# Altium footprint library Package_DFN_QFN.PcbLib: 735 footprints (part 15 of 46)
Each footprint in its own frame and in the unit in brackets; x right, y up, seen from the top. Pads: shape width x height; smd on the part's side, far side on the other; paste and mask are expansions set on the pad; w line width, h text height; cw(c..) or ccw(c..) is an arc to the next point about the centre after c.
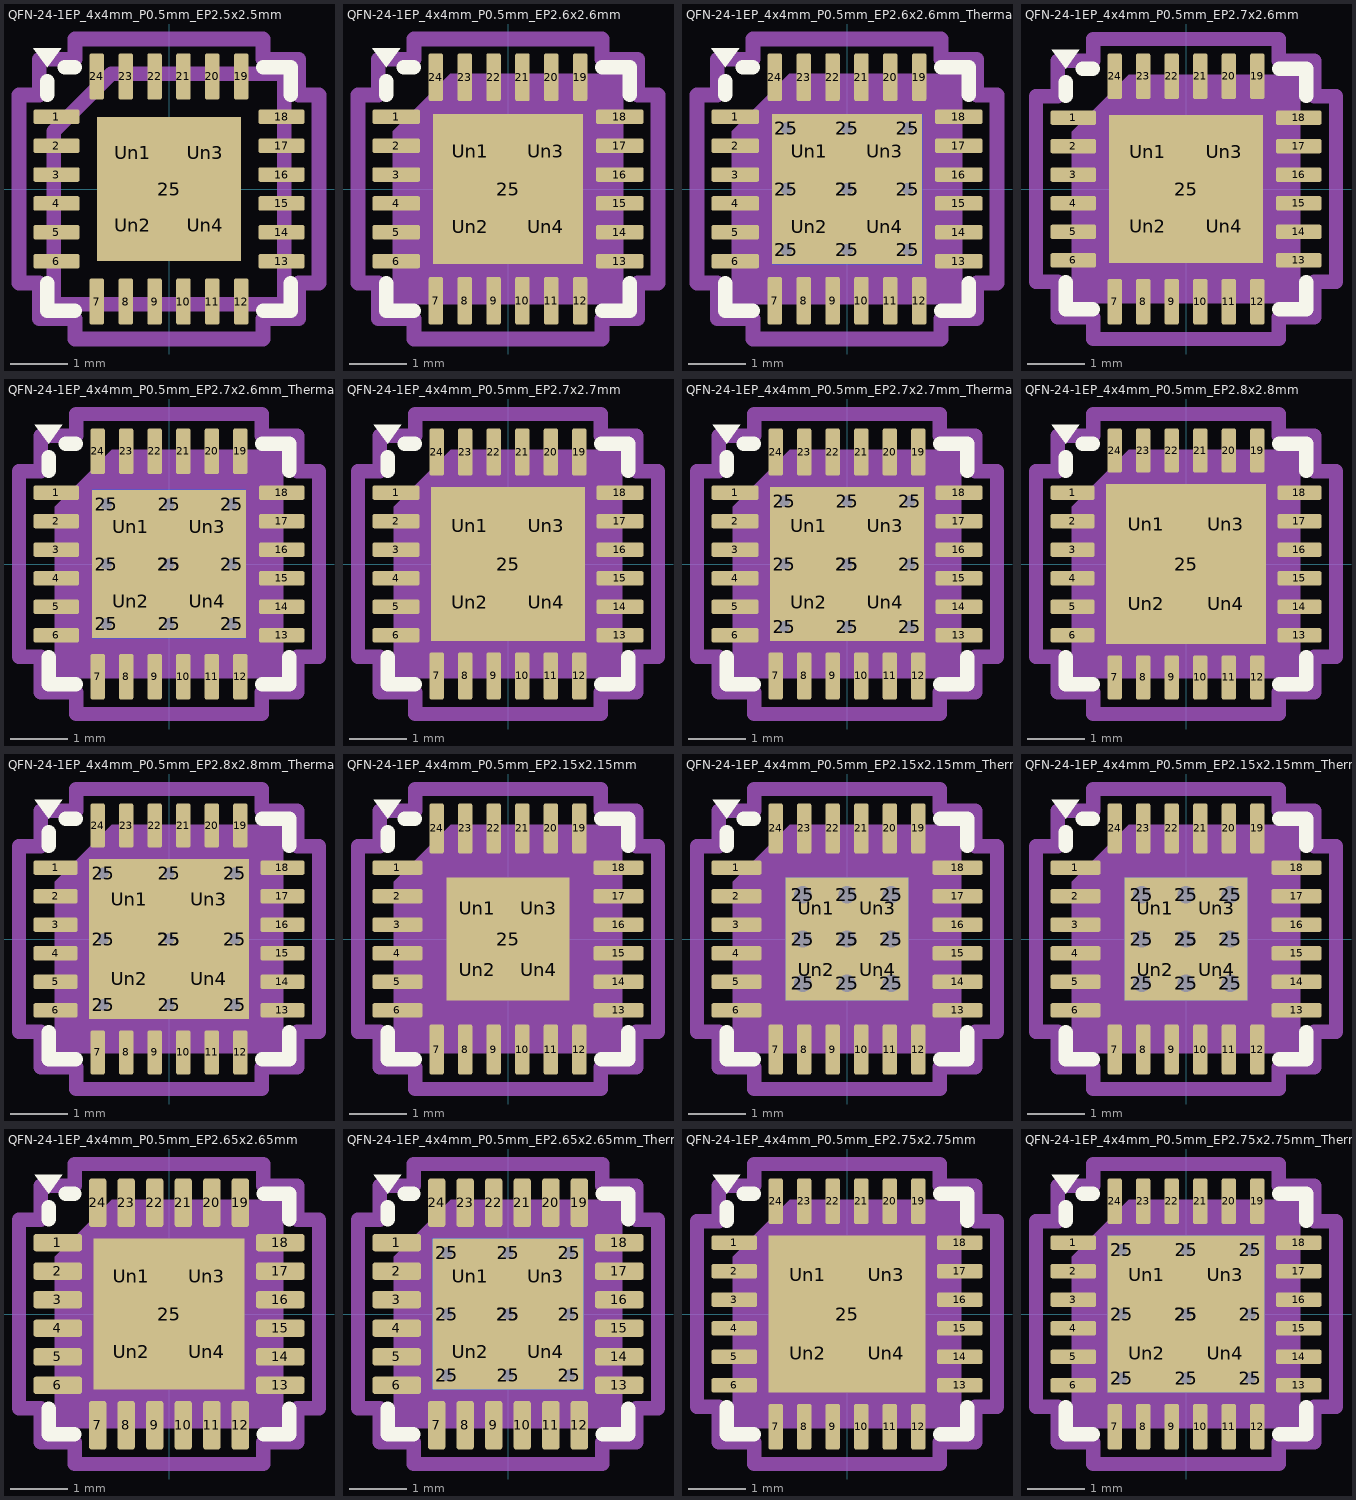
[diagram p14: the footprints below, top view; thin cyan lines are the x and y axes]

## QFN-24-1EP_4x4mm_P0.5mm_EP2.5x2.5mm [mm] "QFN-24-1EP_4x4mm_P0.5mm_EP2.5x2.5mm"
pads (29):
  rrect25% 0.8x0.25 smd: 1(-1.95,1.25) 2(-1.95,0.75) 3(-1.95,0.25) 4(-1.95,-0.25) 5(-1.95,-0.75) 6(-1.95,-1.25) 13(1.95,-1.25) 14(1.95,-0.75) 15(1.95,-0.25) 16(1.95,0.25) 17(1.95,0.75) 18(1.95,1.25)
  rrect25% 0.25x0.8 smd: 7(-1.25,-1.95) 8(-0.75,-1.95) 9(-0.25,-1.95) 10(0.25,-1.95) 11(0.75,-1.95) 12(1.25,-1.95) 19(1.25,1.95) 20(0.75,1.95) 21(0.25,1.95) 22(-0.25,1.95) 23(-0.75,1.95) 24(-1.25,1.95)
  rect 2.5x2.5 smd: 25(0,0)
  rrect25% 1.01x1.01 on Top Paste: Un1(-0.625,0.625) Un2(-0.625,-0.625) Un3(0.625,0.625) Un4(0.625,-0.625)
F.SilkS:
  region: -2.11,2.11 -2.35,2.44 -1.87,2.44
  lines w0.254: -2.11,-1.635 -2.11,-2.11 -1.635,-2.11 ; -2.11,1.635 -2.11,1.87 ; -1.81,2.11 -1.635,2.11 ; 1.635,-2.11 2.11,-2.11 2.11,-1.635 ; 1.635,2.11 2.11,2.11 2.11,1.635
Top Component Center:
  lines w0.127: -0.127,0 0.127,0 -0.127,0 ; 0,-0.127 0,0.127 0,-0.127
Top Assembly:
  lines w0.254: -2,-2 -2,1 -1,2 2,2 2,-2 -2,-2
Top Courtyard:
  lines w0.254: -2.6,-1.63 -2.6,1.63 -2.25,1.63 -2.25,2.25 -1.63,2.25 -1.63,2.6 1.63,2.6 1.63,2.25 2.25,2.25 2.25,1.63 2.6,1.63 2.6,-1.63 2.25,-1.63 2.25,-2.25 1.63,-2.25 1.63,-2.6 -1.63,-2.6 -1.63,-2.25 -2.25,-2.25 -2.25,-1.63 -2.6,-1.63
Top Designator:
  text ".Designator" at -3.43,-0.344 h1.52
3D body "QFN-24-1EP_4x4mm_P0.5mm_EP2.6x2.6mm.step": height 0.77, standoff 0, extent -2,-2 2,2

## QFN-24-1EP_4x4mm_P0.5mm_EP2.6x2.6mm [mm] "QFN-24-1EP_4x4mm_P0.5mm_EP2.6x2.6mm"
pads (29):
  rrect25% 0.825x0.25 smd: 1(-1.937,1.25) 2(-1.937,0.75) 3(-1.937,0.25) 4(-1.937,-0.25) 5(-1.937,-0.75) 6(-1.937,-1.25) 13(1.937,-1.25) 14(1.937,-0.75) 15(1.937,-0.25) 16(1.937,0.25) 17(1.937,0.75) 18(1.937,1.25)
  rrect25% 0.25x0.825 smd: 7(-1.25,-1.937) 8(-0.75,-1.937) 9(-0.25,-1.937) 10(0.25,-1.937) 11(0.75,-1.937) 12(1.25,-1.937) 19(1.25,1.937) 20(0.75,1.937) 21(0.25,1.937) 22(-0.25,1.937) 23(-0.75,1.937) 24(-1.25,1.937)
  rect 2.6x2.6 smd: 25(0,0)
  rrect24% 1.05x1.05 on Top Paste: Un1(-0.65,0.65) Un2(-0.65,-0.65) Un3(0.65,0.65) Un4(0.65,-0.65)
F.SilkS:
  region: -2.11,2.11 -2.35,2.44 -1.87,2.44
  lines w0.254: -2.11,-1.635 -2.11,-2.11 -1.635,-2.11 ; -2.11,1.635 -2.11,1.87 ; -1.81,2.11 -1.635,2.11 ; 1.635,-2.11 2.11,-2.11 2.11,-1.635 ; 1.635,2.11 2.11,2.11 2.11,1.635
Top Component Center:
  lines w0.127: -0.127,0 0.127,0 -0.127,0 ; 0,-0.127 0,0.127 0,-0.127
Top Assembly:
  region: 2,-2 -2,-2 -2,1 -1,2 2,2
Top Courtyard:
  lines w0.254: -2.6,-1.63 -2.6,1.63 -2.25,1.63 -2.25,2.25 -1.63,2.25 -1.63,2.6 1.63,2.6 1.63,2.25 2.25,2.25 2.25,1.63 2.6,1.63 2.6,-1.63 2.25,-1.63 2.25,-2.25 1.63,-2.25 1.63,-2.6 -1.63,-2.6 -1.63,-2.25 -2.25,-2.25 -2.25,-1.63 -2.6,-1.63
Top Designator:
  text ".Designator" at -3.43,-0.344 h1.52
3D body "QFN-24-1EP_4x4mm_P0.5mm_EP2.6x2.6mm.step": height 0.77, standoff 0, extent -2,-2 2,2

## QFN-24-1EP_4x4mm_P0.5mm_EP2.6x2.6mm_ThermalVias [mm] "QFN-24-1EP_4x4mm_P0.5mm_EP2.6x2.6mm_ThermalVias"
pads (39):
  rrect25% 0.825x0.25 smd: 1(-1.937,1.25) 2(-1.937,0.75) 3(-1.937,0.25) 4(-1.937,-0.25) 5(-1.937,-0.75) 6(-1.937,-1.25) 13(1.937,-1.25) 14(1.937,-0.75) 15(1.937,-0.25) 16(1.937,0.25) 17(1.937,0.75) 18(1.937,1.25)
  rrect25% 0.25x0.825 smd: 7(-1.25,-1.937) 8(-0.75,-1.937) 9(-0.25,-1.937) 10(0.25,-1.937) 11(0.75,-1.937) 12(1.25,-1.937) 19(1.25,1.937) 20(0.75,1.937) 21(0.25,1.937) 22(-0.25,1.937) 23(-0.75,1.937) 24(-1.25,1.937)
  round 0.5 hole 0.2: 25(-1.05,-1.05) 25(-1.05,0) 25(-1.05,1.05) 25(0,-1.05) 25(0,0) 25(0,1.05) 25(1.05,-1.05) 25(1.05,0) 25(1.05,1.05)
  rect 2.6x2.6 smd: 25(0,0)
  rect 2.6x2.6 smd far side: 25(0,0)
  rrect22% 1.13x1.13 on Top Paste: Un1(-0.65,0.65) Un2(-0.65,-0.65) Un3(0.65,0.65) Un4(0.65,-0.65)
F.SilkS:
  region: -2.11,2.11 -2.35,2.44 -1.87,2.44
  lines w0.254: -2.11,-1.635 -2.11,-2.11 -1.635,-2.11 ; -2.11,1.635 -2.11,1.87 ; -1.81,2.11 -1.635,2.11 ; 1.635,-2.11 2.11,-2.11 2.11,-1.635 ; 1.635,2.11 2.11,2.11 2.11,1.635
Top Component Center:
  lines w0.127: -0.127,0 0.127,0 -0.127,0 ; 0,-0.127 0,0.127 0,-0.127
Top Assembly:
  region: 2,-2 -2,-2 -2,1 -1,2 2,2
Top Courtyard:
  lines w0.254: -2.6,-1.63 -2.25,-1.63 -2.25,-2.25 -1.63,-2.25 -1.63,-2.6 1.63,-2.6 1.63,-2.25 2.25,-2.25 2.25,-1.63 2.6,-1.63 2.6,1.63 2.25,1.63 2.25,2.25 1.63,2.25 1.63,2.6 -1.63,2.6 -1.63,2.25 -2.25,2.25 -2.25,1.63 -2.6,1.63 -2.6,-1.63
Top Designator:
  text ".Designator" at -3.43,-0.344 h1.52
3D body "QFN-24-1EP_4x4mm_P0.5mm_EP2.6x2.6mm.step": height 0.77, standoff 0, extent -2,-2 2,2

## QFN-24-1EP_4x4mm_P0.5mm_EP2.7x2.6mm [mm] "QFN-24-1EP_4x4mm_P0.5mm_EP2.7x2.6mm"
pads (29):
  rrect25% 0.8x0.25 smd: 1(-1.975,1.25) 2(-1.975,0.75) 3(-1.975,0.25) 4(-1.975,-0.25) 5(-1.975,-0.75) 6(-1.975,-1.25) 13(1.975,-1.25) 14(1.975,-0.75) 15(1.975,-0.25) 16(1.975,0.25) 17(1.975,0.75) 18(1.975,1.25)
  rrect25% 0.25x0.8 smd: 7(-1.25,-1.975) 8(-0.75,-1.975) 9(-0.25,-1.975) 10(0.25,-1.975) 11(0.75,-1.975) 12(1.25,-1.975) 19(1.25,1.975) 20(0.75,1.975) 21(0.25,1.975) 22(-0.25,1.975) 23(-0.75,1.975) 24(-1.25,1.975)
  rect 2.7x2.6 smd: 25(0,0)
  rrect24% 1.09x1.05 on Top Paste: Un1(-0.675,0.65) Un2(-0.675,-0.65) Un3(0.675,0.65) Un4(0.675,-0.65)
F.SilkS:
  region: -2.11,2.11 -2.35,2.44 -1.87,2.44
  lines w0.254: -2.11,-1.635 -2.11,-2.11 -1.635,-2.11 ; -2.11,1.635 -2.11,1.87 ; -1.81,2.11 -1.635,2.11 ; 1.635,-2.11 2.11,-2.11 2.11,-1.635 ; 1.635,2.11 2.11,2.11 2.11,1.635
Top Component Center:
  lines w0.127: -0.127,0 0.127,0 -0.127,0 ; 0,-0.127 0,0.127 0,-0.127
Top Assembly:
  region: 2,-2 -2,-2 -2,1 -1,2 2,2
Top Courtyard:
  lines w0.254: -2.63,-1.63 -2.25,-1.63 -2.25,-2.25 -1.63,-2.25 -1.63,-2.63 1.63,-2.63 1.63,-2.25 2.25,-2.25 2.25,-1.63 2.63,-1.63 2.63,1.63 2.25,1.63 2.25,2.25 1.63,2.25 1.63,2.63 -1.63,2.63 -1.63,2.25 -2.25,2.25 -2.25,1.63 -2.63,1.63 -2.63,-1.63
Top Designator:
  text ".Designator" at -3.43,-0.344 h1.52
3D body "QFN-24-1EP_4x4mm_P0.5mm_EP2.7x2.7mm.step": height 0.77, standoff 0, extent -2,-2 2,2

## QFN-24-1EP_4x4mm_P0.5mm_EP2.7x2.6mm_ThermalVias [mm] "QFN-24-1EP_4x4mm_P0.5mm_EP2.7x2.6mm_ThermalVias"
pads (39):
  rrect25% 0.8x0.25 smd: 1(-1.975,1.25) 2(-1.975,0.75) 3(-1.975,0.25) 4(-1.975,-0.25) 5(-1.975,-0.75) 6(-1.975,-1.25) 13(1.975,-1.25) 14(1.975,-0.75) 15(1.975,-0.25) 16(1.975,0.25) 17(1.975,0.75) 18(1.975,1.25)
  rrect25% 0.25x0.8 smd: 7(-1.25,-1.975) 8(-0.75,-1.975) 9(-0.25,-1.975) 10(0.25,-1.975) 11(0.75,-1.975) 12(1.25,-1.975) 19(1.25,1.975) 20(0.75,1.975) 21(0.25,1.975) 22(-0.25,1.975) 23(-0.75,1.975) 24(-1.25,1.975)
  round 0.5 hole 0.2: 25(-1.1,-1.05) 25(-1.1,0) 25(-1.1,1.05) 25(0,-1.05) 25(0,0) 25(0,1.05) 25(1.1,-1.05) 25(1.1,0) 25(1.1,1.05)
  rect 2.7x2.6 smd: 25(0,0)
  rect 2.7x2.6 smd far side: 25(0,0)
  rrect22% 1.17x1.13 on Top Paste: Un1(-0.675,0.65) Un2(-0.675,-0.65) Un3(0.675,0.65) Un4(0.675,-0.65)
F.SilkS:
  region: -2.11,2.11 -2.35,2.44 -1.87,2.44
  lines w0.254: -2.11,-1.635 -2.11,-2.11 -1.635,-2.11 ; -2.11,1.635 -2.11,1.87 ; -1.81,2.11 -1.635,2.11 ; 1.635,-2.11 2.11,-2.11 2.11,-1.635 ; 1.635,2.11 2.11,2.11 2.11,1.635
Top Component Center:
  lines w0.127: -0.127,0 0.127,0 -0.127,0 ; 0,-0.127 0,0.127 0,-0.127
Top Assembly:
  region: 2,-2 -2,-2 -2,1 -1,2 2,2
Top Courtyard:
  lines w0.254: -2.63,-1.63 -2.25,-1.63 -2.25,-2.25 -1.63,-2.25 -1.63,-2.63 1.63,-2.63 1.63,-2.25 2.25,-2.25 2.25,-1.63 2.63,-1.63 2.63,1.63 2.25,1.63 2.25,2.25 1.63,2.25 1.63,2.63 -1.63,2.63 -1.63,2.25 -2.25,2.25 -2.25,1.63 -2.63,1.63 -2.63,-1.63
Top Designator:
  text ".Designator" at -3.43,-0.344 h1.52
3D body "QFN-24-1EP_4x4mm_P0.5mm_EP2.7x2.7mm.step": height 0.77, standoff 0, extent -2,-2 2,2

## QFN-24-1EP_4x4mm_P0.5mm_EP2.7x2.7mm [mm] "QFN-24-1EP_4x4mm_P0.5mm_EP2.7x2.7mm"
pads (29):
  rrect25% 0.825x0.25 smd: 1(-1.963,1.25) 2(-1.963,0.75) 3(-1.963,0.25) 4(-1.963,-0.25) 5(-1.963,-0.75) 6(-1.963,-1.25) 13(1.963,-1.25) 14(1.963,-0.75) 15(1.963,-0.25) 16(1.963,0.25) 17(1.963,0.75) 18(1.963,1.25)
  rrect25% 0.25x0.825 smd: 7(-1.25,-1.963) 8(-0.75,-1.963) 9(-0.25,-1.963) 10(0.25,-1.963) 11(0.75,-1.963) 12(1.25,-1.963) 19(1.25,1.963) 20(0.75,1.963) 21(0.25,1.963) 22(-0.25,1.963) 23(-0.75,1.963) 24(-1.25,1.963)
  rect 2.7x2.7 smd: 25(0,0)
  rrect23% 1.09x1.09 on Top Paste: Un1(-0.675,0.675) Un2(-0.675,-0.675) Un3(0.675,0.675) Un4(0.675,-0.675)
F.SilkS:
  region: -2.11,2.11 -2.35,2.44 -1.87,2.44
  lines w0.254: -2.11,-1.635 -2.11,-2.11 -1.635,-2.11 ; -2.11,1.635 -2.11,1.87 ; -1.81,2.11 -1.635,2.11 ; 1.635,-2.11 2.11,-2.11 2.11,-1.635 ; 1.635,2.11 2.11,2.11 2.11,1.635
Top Component Center:
  lines w0.127: -0.127,0 0.127,0 -0.127,0 ; 0,-0.127 0,0.127 0,-0.127
Top Assembly:
  region: 2,-2 -2,-2 -2,1 -1,2 2,2
Top Courtyard:
  lines w0.254: -2.63,-1.63 -2.25,-1.63 -2.25,-2.25 -1.63,-2.25 -1.63,-2.63 1.63,-2.63 1.63,-2.25 2.25,-2.25 2.25,-1.63 2.63,-1.63 2.63,1.63 2.25,1.63 2.25,2.25 1.63,2.25 1.63,2.63 -1.63,2.63 -1.63,2.25 -2.25,2.25 -2.25,1.63 -2.63,1.63 -2.63,-1.63
Top Designator:
  text ".Designator" at -3.43,-0.344 h1.52
3D body "QFN-24-1EP_4x4mm_P0.5mm_EP2.7x2.7mm.step": height 0.77, standoff 0, extent -2,-2 2,2

## QFN-24-1EP_4x4mm_P0.5mm_EP2.7x2.7mm_ThermalVias [mm] "QFN-24-1EP_4x4mm_P0.5mm_EP2.7x2.7mm_ThermalVias"
pads (39):
  rrect25% 0.825x0.25 smd: 1(-1.963,1.25) 2(-1.963,0.75) 3(-1.963,0.25) 4(-1.963,-0.25) 5(-1.963,-0.75) 6(-1.963,-1.25) 13(1.963,-1.25) 14(1.963,-0.75) 15(1.963,-0.25) 16(1.963,0.25) 17(1.963,0.75) 18(1.963,1.25)
  rrect25% 0.25x0.825 smd: 7(-1.25,-1.963) 8(-0.75,-1.963) 9(-0.25,-1.963) 10(0.25,-1.963) 11(0.75,-1.963) 12(1.25,-1.963) 19(1.25,1.963) 20(0.75,1.963) 21(0.25,1.963) 22(-0.25,1.963) 23(-0.75,1.963) 24(-1.25,1.963)
  round 0.5 hole 0.2: 25(-1.1,-1.1) 25(-1.1,0) 25(-1.1,1.1) 25(0,-1.1) 25(0,0) 25(0,1.1) 25(1.1,-1.1) 25(1.1,0) 25(1.1,1.1)
  rect 2.7x2.7 smd: 25(0,0)
  rect 2.7x2.7 smd far side: 25(0,0)
  rrect21% 1.17x1.17 on Top Paste: Un1(-0.675,0.675) Un2(-0.675,-0.675) Un3(0.675,0.675) Un4(0.675,-0.675)
F.SilkS:
  region: -2.11,2.11 -2.35,2.44 -1.87,2.44
  lines w0.254: -2.11,-1.635 -2.11,-2.11 -1.635,-2.11 ; -2.11,1.635 -2.11,1.87 ; -1.81,2.11 -1.635,2.11 ; 1.635,-2.11 2.11,-2.11 2.11,-1.635 ; 1.635,2.11 2.11,2.11 2.11,1.635
Top Component Center:
  lines w0.127: -0.127,0 0.127,0 -0.127,0 ; 0,-0.127 0,0.127 0,-0.127
Top Assembly:
  region: 2,-2 -2,-2 -2,1 -1,2 2,2
Top Courtyard:
  lines w0.254: -2.63,-1.63 -2.25,-1.63 -2.25,-2.25 -1.63,-2.25 -1.63,-2.63 1.63,-2.63 1.63,-2.25 2.25,-2.25 2.25,-1.63 2.63,-1.63 2.63,1.63 2.25,1.63 2.25,2.25 1.63,2.25 1.63,2.63 -1.63,2.63 -1.63,2.25 -2.25,2.25 -2.25,1.63 -2.63,1.63 -2.63,-1.63
Top Designator:
  text ".Designator" at -3.43,-0.344 h1.52
3D body "QFN-24-1EP_4x4mm_P0.5mm_EP2.7x2.7mm.step": height 0.77, standoff 0, extent -2,-2 2,2

## QFN-24-1EP_4x4mm_P0.5mm_EP2.8x2.8mm [mm] "QFN-24-1EP_4x4mm_P0.5mm_EP2.8x2.8mm"
pads (29):
  rrect25% 0.775x0.25 smd: 1(-1.987,1.25) 2(-1.987,0.75) 3(-1.987,0.25) 4(-1.987,-0.25) 5(-1.987,-0.75) 6(-1.987,-1.25) 13(1.987,-1.25) 14(1.987,-0.75) 15(1.987,-0.25) 16(1.987,0.25) 17(1.987,0.75) 18(1.987,1.25)
  rrect25% 0.25x0.775 smd: 7(-1.25,-1.987) 8(-0.75,-1.987) 9(-0.25,-1.987) 10(0.25,-1.987) 11(0.75,-1.987) 12(1.25,-1.987) 19(1.25,1.987) 20(0.75,1.987) 21(0.25,1.987) 22(-0.25,1.987) 23(-0.75,1.987) 24(-1.25,1.987)
  rect 2.8x2.8 smd: 25(0,0)
  rrect22% 1.13x1.13 on Top Paste: Un1(-0.7,0.7) Un2(-0.7,-0.7) Un3(0.7,0.7) Un4(0.7,-0.7)
F.SilkS:
  region: -2.11,2.11 -2.35,2.44 -1.87,2.44
  lines w0.254: -2.11,-1.635 -2.11,-2.11 -1.635,-2.11 ; -2.11,1.635 -2.11,1.87 ; -1.81,2.11 -1.635,2.11 ; 1.635,-2.11 2.11,-2.11 2.11,-1.635 ; 1.635,2.11 2.11,2.11 2.11,1.635
Top Component Center:
  lines w0.127: -0.127,0 0.127,0 -0.127,0 ; 0,-0.127 0,0.127 0,-0.127
Top Assembly:
  region: 2,-2 -2,-2 -2,1 -1,2 2,2
Top Courtyard:
  lines w0.254: -2.63,-1.63 -2.63,1.63 -2.25,1.63 -2.25,2.25 -1.63,2.25 -1.63,2.63 1.63,2.63 1.63,2.25 2.25,2.25 2.25,1.63 2.63,1.63 2.63,-1.63 2.25,-1.63 2.25,-2.25 1.63,-2.25 1.63,-2.63 -1.63,-2.63 -1.63,-2.25 -2.25,-2.25 -2.25,-1.63 -2.63,-1.63
Top Designator:
  text ".Designator" at -3.43,-0.344 h1.52
3D body "QFN-24-1EP_4x4mm_P0.5mm_EP2.7x2.7mm.step": height 0.77, standoff 0, extent -2,-2 2,2

## QFN-24-1EP_4x4mm_P0.5mm_EP2.8x2.8mm_ThermalVias [mm] "QFN-24-1EP_4x4mm_P0.5mm_EP2.8x2.8mm_ThermalVias"
pads (39):
  rrect25% 0.775x0.25 smd: 1(-1.987,1.25) 2(-1.987,0.75) 3(-1.987,0.25) 4(-1.987,-0.25) 5(-1.987,-0.75) 6(-1.987,-1.25) 13(1.987,-1.25) 14(1.987,-0.75) 15(1.987,-0.25) 16(1.987,0.25) 17(1.987,0.75) 18(1.987,1.25)
  rrect25% 0.25x0.775 smd: 7(-1.25,-1.987) 8(-0.75,-1.987) 9(-0.25,-1.987) 10(0.25,-1.987) 11(0.75,-1.987) 12(1.25,-1.987) 19(1.25,1.987) 20(0.75,1.987) 21(0.25,1.987) 22(-0.25,1.987) 23(-0.75,1.987) 24(-1.25,1.987)
  round 0.5 hole 0.2: 25(-1.15,-1.15) 25(-1.15,0) 25(-1.15,1.15) 25(0,-1.15) 25(0,0) 25(0,1.15) 25(1.15,-1.15) 25(1.15,0) 25(1.15,1.15)
  rect 2.8x2.8 smd: 25(0,0)
  rect 2.8x2.8 smd far side: 25(0,0)
  rrect21% 1.21x1.21 on Top Paste: Un1(-0.7,0.7) Un2(-0.7,-0.7) Un3(0.7,0.7) Un4(0.7,-0.7)
F.SilkS:
  region: -2.11,2.11 -2.35,2.44 -1.87,2.44
  lines w0.254: -2.11,-1.635 -2.11,-2.11 -1.635,-2.11 ; -2.11,1.635 -2.11,1.87 ; -1.81,2.11 -1.635,2.11 ; 1.635,-2.11 2.11,-2.11 2.11,-1.635 ; 1.635,2.11 2.11,2.11 2.11,1.635
Top Component Center:
  lines w0.127: -0.127,0 0.127,0 -0.127,0 ; 0,-0.127 0,0.127 0,-0.127
Top Assembly:
  region: 2,-2 -2,-2 -2,1 -1,2 2,2
Top Courtyard:
  lines w0.254: -2.63,-1.63 -2.63,1.63 -2.25,1.63 -2.25,2.25 -1.63,2.25 -1.63,2.63 1.63,2.63 1.63,2.25 2.25,2.25 2.25,1.63 2.63,1.63 2.63,-1.63 2.25,-1.63 2.25,-2.25 1.63,-2.25 1.63,-2.63 -1.63,-2.63 -1.63,-2.25 -2.25,-2.25 -2.25,-1.63 -2.63,-1.63
Top Designator:
  text ".Designator" at -3.43,-0.344 h1.52
3D body "QFN-24-1EP_4x4mm_P0.5mm_EP2.7x2.7mm.step": height 0.77, standoff 0, extent -2,-2 2,2

## QFN-24-1EP_4x4mm_P0.5mm_EP2.15x2.15mm [mm] "QFN-24-1EP_4x4mm_P0.5mm_EP2.15x2.15mm"
pads (29):
  rrect25% 0.875x0.25 smd: 1(-1.937,1.25) 2(-1.937,0.75) 3(-1.937,0.25) 4(-1.937,-0.25) 5(-1.937,-0.75) 6(-1.937,-1.25) 13(1.937,-1.25) 14(1.937,-0.75) 15(1.937,-0.25) 16(1.937,0.25) 17(1.937,0.75) 18(1.937,1.25)
  rrect25% 0.25x0.875 smd: 7(-1.25,-1.937) 8(-0.75,-1.937) 9(-0.25,-1.937) 10(0.25,-1.937) 11(0.75,-1.937) 12(1.25,-1.937) 19(1.25,1.937) 20(0.75,1.937) 21(0.25,1.937) 22(-0.25,1.937) 23(-0.75,1.937) 24(-1.25,1.937)
  rect 2.15x2.15 smd: 25(0,0)
  rrect25% 0.87x0.87 on Top Paste: Un1(-0.54,0.54) Un2(-0.54,-0.54) Un3(0.54,0.54) Un4(0.54,-0.54)
F.SilkS:
  region: -2.11,2.11 -2.35,2.44 -1.87,2.44
  lines w0.254: -2.11,-1.635 -2.11,-2.11 -1.635,-2.11 ; -2.11,1.635 -2.11,1.87 ; -1.81,2.11 -1.635,2.11 ; 1.635,-2.11 2.11,-2.11 2.11,-1.635 ; 1.635,2.11 2.11,2.11 2.11,1.635
Top Component Center:
  lines w0.127: -0.127,0 0.127,0 -0.127,0 ; 0,-0.127 0,0.127 0,-0.127
Top Assembly:
  region: 2,-2 -2,-2 -2,1 -1,2 2,2
Top Courtyard:
  lines w0.254: -2.63,-1.63 -2.25,-1.63 -2.25,-2.25 -1.63,-2.25 -1.63,-2.63 1.63,-2.63 1.63,-2.25 2.25,-2.25 2.25,-1.63 2.63,-1.63 2.63,1.63 2.25,1.63 2.25,2.25 1.63,2.25 1.63,2.63 -1.63,2.63 -1.63,2.25 -2.25,2.25 -2.25,1.63 -2.63,1.63 -2.63,-1.63
Top Designator:
  text ".Designator" at -3.43,-0.344 h1.52
3D body "QFN-24-1EP_4x4mm_P0.5mm_EP2.6x2.6mm.step": height 0.77, standoff 0, extent -2,-2 2,2

## QFN-24-1EP_4x4mm_P0.5mm_EP2.15x2.15mm_ThermalVias [mm] "QFN-24-1EP_4x4mm_P0.5mm_EP2.15x2.15mm_ThermalVias"
pads (39):
  rrect25% 0.875x0.25 smd: 1(-1.937,1.25) 2(-1.937,0.75) 3(-1.937,0.25) 4(-1.937,-0.25) 5(-1.937,-0.75) 6(-1.937,-1.25) 13(1.937,-1.25) 14(1.937,-0.75) 15(1.937,-0.25) 16(1.937,0.25) 17(1.937,0.75) 18(1.937,1.25)
  rrect25% 0.25x0.875 smd: 7(-1.25,-1.937) 8(-0.75,-1.937) 9(-0.25,-1.937) 10(0.25,-1.937) 11(0.75,-1.937) 12(1.25,-1.937) 19(1.25,1.937) 20(0.75,1.937) 21(0.25,1.937) 22(-0.25,1.937) 23(-0.75,1.937) 24(-1.25,1.937)
  round 0.6 hole 0.3: 25(-0.775,-0.775) 25(-0.775,0) 25(-0.775,0.775) 25(0,-0.775) 25(0,0) 25(0,0.775) 25(0.775,-0.775) 25(0.775,0) 25(0.775,0.775)
  rect 2.15x2.15 smd: 25(0,0)
  rect 2.15x2.15 smd far side: 25(0,0)
  rrect25% 0.87x0.87 on Top Paste: Un1(-0.54,0.54) Un2(-0.54,-0.54) Un3(0.54,0.54) Un4(0.54,-0.54)
F.SilkS:
  region: -2.11,2.11 -2.35,2.44 -1.87,2.44
  lines w0.254: -2.11,-1.635 -2.11,-2.11 -1.635,-2.11 ; -2.11,1.635 -2.11,1.87 ; -1.81,2.11 -1.635,2.11 ; 1.635,-2.11 2.11,-2.11 2.11,-1.635 ; 1.635,2.11 2.11,2.11 2.11,1.635
Top Component Center:
  lines w0.127: -0.127,0 0.127,0 -0.127,0 ; 0,-0.127 0,0.127 0,-0.127
Top Assembly:
  region: 2,-2 -2,-2 -2,1 -1,2 2,2
Top Courtyard:
  lines w0.254: -2.63,-1.63 -2.25,-1.63 -2.25,-2.25 -1.63,-2.25 -1.63,-2.63 1.63,-2.63 1.63,-2.25 2.25,-2.25 2.25,-1.63 2.63,-1.63 2.63,1.63 2.25,1.63 2.25,2.25 1.63,2.25 1.63,2.63 -1.63,2.63 -1.63,2.25 -2.25,2.25 -2.25,1.63 -2.63,1.63 -2.63,-1.63
Top Designator:
  text ".Designator" at -3.43,-0.344 h1.52
3D body "QFN-24-1EP_4x4mm_P0.5mm_EP2.6x2.6mm.step": height 0.77, standoff 0, extent -2,-2 2,2

## QFN-24-1EP_4x4mm_P0.5mm_EP2.15x2.15mm_ThermalVias_Bottom [mm] "QFN-24-1EP_4x4mm_P0.5mm_EP2.15x2.15mm_ThermalVias"
pads (40):
  rrect25% 0.875x0.25 smd: 1(-1.937,1.25) 2(-1.937,0.75) 3(-1.937,0.25) 4(-1.937,-0.25) 5(-1.937,-0.75) 6(-1.937,-1.25) 13(1.937,-1.25) 14(1.937,-0.75) 15(1.937,-0.25) 16(1.937,0.25) 17(1.937,0.75) 18(1.937,1.25)
  rrect25% 0.25x0.875 smd: 7(-1.25,-1.937) 8(-0.75,-1.937) 9(-0.25,-1.937) 10(0.25,-1.937) 11(0.75,-1.937) 12(1.25,-1.937) 19(1.25,1.937) 20(0.75,1.937) 21(0.25,1.937) 22(-0.25,1.937) 23(-0.75,1.937) 24(-1.25,1.937)
  round 0.6 hole 0.3: 25(-0.775,-0.775) 25(-0.775,0) 25(-0.775,0.775) 25(0,-0.775) 25(0,0) 25(0,0.775) 25(0.775,-0.775) 25(0.775,0) 25(0.775,0.775)
  rect 2.15x2.15 smd: 25(0,0)
  rect 2.15x2.15 smd far side: 25(0,0) 25(0,0)
  rrect25% 0.87x0.87 on Top Paste: Un1(-0.54,0.54) Un2(-0.54,-0.54) Un3(0.54,0.54) Un4(0.54,-0.54)
F.SilkS:
  region: -2.11,2.11 -2.35,2.44 -1.87,2.44
  lines w0.254: -2.11,-1.635 -2.11,-2.11 -1.635,-2.11 ; -2.11,1.635 -2.11,1.87 ; -1.81,2.11 -1.635,2.11 ; 1.635,-2.11 2.11,-2.11 2.11,-1.635 ; 1.635,2.11 2.11,2.11 2.11,1.635
Top Component Center:
  lines w0.127: -0.127,0 0.127,0 -0.127,0 ; 0,-0.127 0,0.127 0,-0.127
Top Assembly:
  region: 2,-2 -2,-2 -2,1 -1,2 2,2
Top Courtyard:
  lines w0.254: -2.63,-1.63 -2.25,-1.63 -2.25,-2.25 -1.63,-2.25 -1.63,-2.63 1.63,-2.63 1.63,-2.25 2.25,-2.25 2.25,-1.63 2.63,-1.63 2.63,1.63 2.25,1.63 2.25,2.25 1.63,2.25 1.63,2.63 -1.63,2.63 -1.63,2.25 -2.25,2.25 -2.25,1.63 -2.63,1.63 -2.63,-1.63
Top Designator:
  text ".Designator" at -3.43,-0.344 h1.52
3D body "QFN-24-1EP_4x4mm_P0.5mm_EP2.6x2.6mm.step": height 0.77, standoff 0, extent -2,-2 2,2

## QFN-24-1EP_4x4mm_P0.5mm_EP2.65x2.65mm [mm] "QFN-24-1EP_4x4mm_P0.5mm_EP2.65x2.65mm"
pads (29):
  rrect25% 0.85x0.3 smd: 1(-1.95,1.25) 2(-1.95,0.75) 3(-1.95,0.25) 4(-1.95,-0.25) 5(-1.95,-0.75) 6(-1.95,-1.25) 13(1.95,-1.25) 14(1.95,-0.75) 15(1.95,-0.25) 16(1.95,0.25) 17(1.95,0.75) 18(1.95,1.25)
  rrect25% 0.3x0.85 smd: 7(-1.25,-1.95) 8(-0.75,-1.95) 9(-0.25,-1.95) 10(0.25,-1.95) 11(0.75,-1.95) 12(1.25,-1.95) 19(1.25,1.95) 20(0.75,1.95) 21(0.25,1.95) 22(-0.25,1.95) 23(-0.75,1.95) 24(-1.25,1.95)
  rect 2.65x2.65 smd: 25(0,0)
  rrect23% 1.07x1.07 on Top Paste: Un1(-0.66,0.66) Un2(-0.66,-0.66) Un3(0.66,0.66) Un4(0.66,-0.66)
F.SilkS:
  region: -2.11,2.11 -2.35,2.44 -1.87,2.44
  lines w0.254: -2.11,-1.66 -2.11,-2.11 -1.66,-2.11 ; -2.11,1.66 -2.11,1.87 ; -1.81,2.11 -1.66,2.11 ; 1.66,-2.11 2.11,-2.11 2.11,-1.66 ; 1.66,2.11 2.11,2.11 2.11,1.66
Top Component Center:
  lines w0.127: -0.127,0 0.127,0 -0.127,0 ; 0,-0.127 0,0.127 0,-0.127
Top Assembly:
  region: 2,-2 -2,-2 -2,1 -1,2 2,2
Top Courtyard:
  lines w0.254: -2.63,-1.65 -2.25,-1.65 -2.25,-2.25 -1.65,-2.25 -1.65,-2.63 1.65,-2.63 1.65,-2.25 2.25,-2.25 2.25,-1.65 2.63,-1.65 2.63,1.65 2.25,1.65 2.25,2.25 1.65,2.25 1.65,2.63 -1.65,2.63 -1.65,2.25 -2.25,2.25 -2.25,1.65 -2.63,1.65 -2.63,-1.65
Top Designator:
  text ".Designator" at -3.43,-0.344 h1.52
3D body "QFN-24-1EP_4x4mm_P0.5mm_EP2.6x2.6mm.step": height 0.77, standoff 0, extent -2,-2 2,2

## QFN-24-1EP_4x4mm_P0.5mm_EP2.65x2.65mm_ThermalVias [mm] "QFN-24-1EP_4x4mm_P0.5mm_EP2.65x2.65mm_ThermalVias"
pads (39):
  rrect25% 0.85x0.3 smd: 1(-1.95,1.25) 2(-1.95,0.75) 3(-1.95,0.25) 4(-1.95,-0.25) 5(-1.95,-0.75) 6(-1.95,-1.25) 13(1.95,-1.25) 14(1.95,-0.75) 15(1.95,-0.25) 16(1.95,0.25) 17(1.95,0.75) 18(1.95,1.25)
  rrect25% 0.3x0.85 smd: 7(-1.25,-1.95) 8(-0.75,-1.95) 9(-0.25,-1.95) 10(0.25,-1.95) 11(0.75,-1.95) 12(1.25,-1.95) 19(1.25,1.95) 20(0.75,1.95) 21(0.25,1.95) 22(-0.25,1.95) 23(-0.75,1.95) 24(-1.25,1.95)
  round 0.5 hole 0.2: 25(-1.075,-1.075) 25(-1.075,0) 25(-1.075,1.075) 25(0,-1.075) 25(0,0) 25(0,1.075) 25(1.075,-1.075) 25(1.075,0) 25(1.075,1.075)
  rect 2.65x2.65 smd: 25(0,0)
  rect 2.65x2.65 smd far side: 25(0,0)
  rrect22% 1.15x1.15 on Top Paste: Un1(-0.66,0.66) Un2(-0.66,-0.66) Un3(0.66,0.66) Un4(0.66,-0.66)
F.SilkS:
  region: -2.11,2.11 -2.35,2.44 -1.87,2.44
  lines w0.254: -2.11,-1.66 -2.11,-2.11 -1.66,-2.11 ; -2.11,1.66 -2.11,1.87 ; -1.81,2.11 -1.66,2.11 ; 1.66,-2.11 2.11,-2.11 2.11,-1.66 ; 1.66,2.11 2.11,2.11 2.11,1.66
Top Component Center:
  lines w0.127: -0.127,0 0.127,0 -0.127,0 ; 0,-0.127 0,0.127 0,-0.127
Top Assembly:
  region: 2,-2 -2,-2 -2,1 -1,2 2,2
Top Courtyard:
  lines w0.254: -2.63,-1.65 -2.63,1.65 -2.25,1.65 -2.25,2.25 -1.65,2.25 -1.65,2.63 1.65,2.63 1.65,2.25 2.25,2.25 2.25,1.65 2.63,1.65 2.63,-1.65 2.25,-1.65 2.25,-2.25 1.65,-2.25 1.65,-2.63 -1.65,-2.63 -1.65,-2.25 -2.25,-2.25 -2.25,-1.65 -2.63,-1.65
Top Designator:
  text ".Designator" at -3.43,-0.344 h1.52
3D body "QFN-24-1EP_4x4mm_P0.5mm_EP2.6x2.6mm.step": height 0.77, standoff 0, extent -2,-2 2,2

## QFN-24-1EP_4x4mm_P0.5mm_EP2.75x2.75mm [mm] "QFN-24-1EP_4x4mm_P0.5mm_EP2.75x2.75mm"
pads (29):
  rrect25% 0.8x0.25 smd: 1(-1.975,1.25) 2(-1.975,0.75) 3(-1.975,0.25) 4(-1.975,-0.25) 5(-1.975,-0.75) 6(-1.975,-1.25) 13(1.975,-1.25) 14(1.975,-0.75) 15(1.975,-0.25) 16(1.975,0.25) 17(1.975,0.75) 18(1.975,1.25)
  rrect25% 0.25x0.8 smd: 7(-1.25,-1.975) 8(-0.75,-1.975) 9(-0.25,-1.975) 10(0.25,-1.975) 11(0.75,-1.975) 12(1.25,-1.975) 19(1.25,1.975) 20(0.75,1.975) 21(0.25,1.975) 22(-0.25,1.975) 23(-0.75,1.975) 24(-1.25,1.975)
  rect 2.75x2.75 smd: 25(0,0)
  rrect23% 1.11x1.11 on Top Paste: Un1(-0.69,0.69) Un2(-0.69,-0.69) Un3(0.69,0.69) Un4(0.69,-0.69)
F.SilkS:
  region: -2.11,2.11 -2.35,2.44 -1.87,2.44
  lines w0.254: -2.11,-1.635 -2.11,-2.11 -1.635,-2.11 ; -2.11,1.635 -2.11,1.87 ; -1.81,2.11 -1.635,2.11 ; 1.635,-2.11 2.11,-2.11 2.11,-1.635 ; 1.635,2.11 2.11,2.11 2.11,1.635
Top Component Center:
  lines w0.127: -0.127,0 0.127,0 -0.127,0 ; 0,-0.127 0,0.127 0,-0.127
Top Assembly:
  region: 2,-2 -2,-2 -2,1 -1,2 2,2
Top Courtyard:
  lines w0.254: -2.63,-1.63 -2.25,-1.63 -2.25,-2.25 -1.63,-2.25 -1.63,-2.63 1.63,-2.63 1.63,-2.25 2.25,-2.25 2.25,-1.63 2.63,-1.63 2.63,1.63 2.25,1.63 2.25,2.25 1.63,2.25 1.63,2.63 -1.63,2.63 -1.63,2.25 -2.25,2.25 -2.25,1.63 -2.63,1.63 -2.63,-1.63
Top Designator:
  text ".Designator" at -3.43,-0.344 h1.52
3D body "QFN-24-1EP_4x4mm_P0.5mm_EP2.7x2.7mm.step": height 0.77, standoff 0, extent -2,-2 2,2

## QFN-24-1EP_4x4mm_P0.5mm_EP2.75x2.75mm_ThermalVias [mm] "QFN-24-1EP_4x4mm_P0.5mm_EP2.75x2.75mm_ThermalVias"
pads (39):
  rrect25% 0.8x0.25 smd: 1(-1.975,1.25) 2(-1.975,0.75) 3(-1.975,0.25) 4(-1.975,-0.25) 5(-1.975,-0.75) 6(-1.975,-1.25) 13(1.975,-1.25) 14(1.975,-0.75) 15(1.975,-0.25) 16(1.975,0.25) 17(1.975,0.75) 18(1.975,1.25)
  rrect25% 0.25x0.8 smd: 7(-1.25,-1.975) 8(-0.75,-1.975) 9(-0.25,-1.975) 10(0.25,-1.975) 11(0.75,-1.975) 12(1.25,-1.975) 19(1.25,1.975) 20(0.75,1.975) 21(0.25,1.975) 22(-0.25,1.975) 23(-0.75,1.975) 24(-1.25,1.975)
  round 0.5 hole 0.2: 25(-1.125,-1.125) 25(-1.125,0) 25(-1.125,1.125) 25(0,-1.125) 25(0,0) 25(0,1.125) 25(1.125,-1.125) 25(1.125,0) 25(1.125,1.125)
  rect 2.75x2.75 smd: 25(0,0)
  rect 2.75x2.75 smd far side: 25(0,0)
  rrect21% 1.19x1.19 on Top Paste: Un1(-0.69,0.69) Un2(-0.69,-0.69) Un3(0.69,0.69) Un4(0.69,-0.69)
F.SilkS:
  region: -2.11,2.11 -2.35,2.44 -1.87,2.44
  lines w0.254: -2.11,-1.635 -2.11,-2.11 -1.635,-2.11 ; -2.11,1.635 -2.11,1.87 ; -1.81,2.11 -1.635,2.11 ; 1.635,-2.11 2.11,-2.11 2.11,-1.635 ; 1.635,2.11 2.11,2.11 2.11,1.635
Top Component Center:
  lines w0.127: -0.127,0 0.127,0 -0.127,0 ; 0,-0.127 0,0.127 0,-0.127
Top Assembly:
  region: 2,-2 -2,-2 -2,1 -1,2 2,2
Top Courtyard:
  lines w0.254: -2.63,-1.63 -2.25,-1.63 -2.25,-2.25 -1.63,-2.25 -1.63,-2.63 1.63,-2.63 1.63,-2.25 2.25,-2.25 2.25,-1.63 2.63,-1.63 2.63,1.63 2.25,1.63 2.25,2.25 1.63,2.25 1.63,2.63 -1.63,2.63 -1.63,2.25 -2.25,2.25 -2.25,1.63 -2.63,1.63 -2.63,-1.63
Top Designator:
  text ".Designator" at -3.43,-0.344 h1.52
3D body "QFN-24-1EP_4x4mm_P0.5mm_EP2.7x2.7mm.step": height 0.77, standoff 0, extent -2,-2 2,2